# Altium footprint library DIM.PcbLib: 183 footprints (part 8 of 12)
Each footprint in its own frame and in the unit in brackets; x right, y up, seen from the top. Pads: shape width x height; smd on the part's side, far side on the other; paste and mask are expansions set on the pad; w line width, h text height; cw(c..) or ccw(c..) is an arc to the next point about the centre after c.
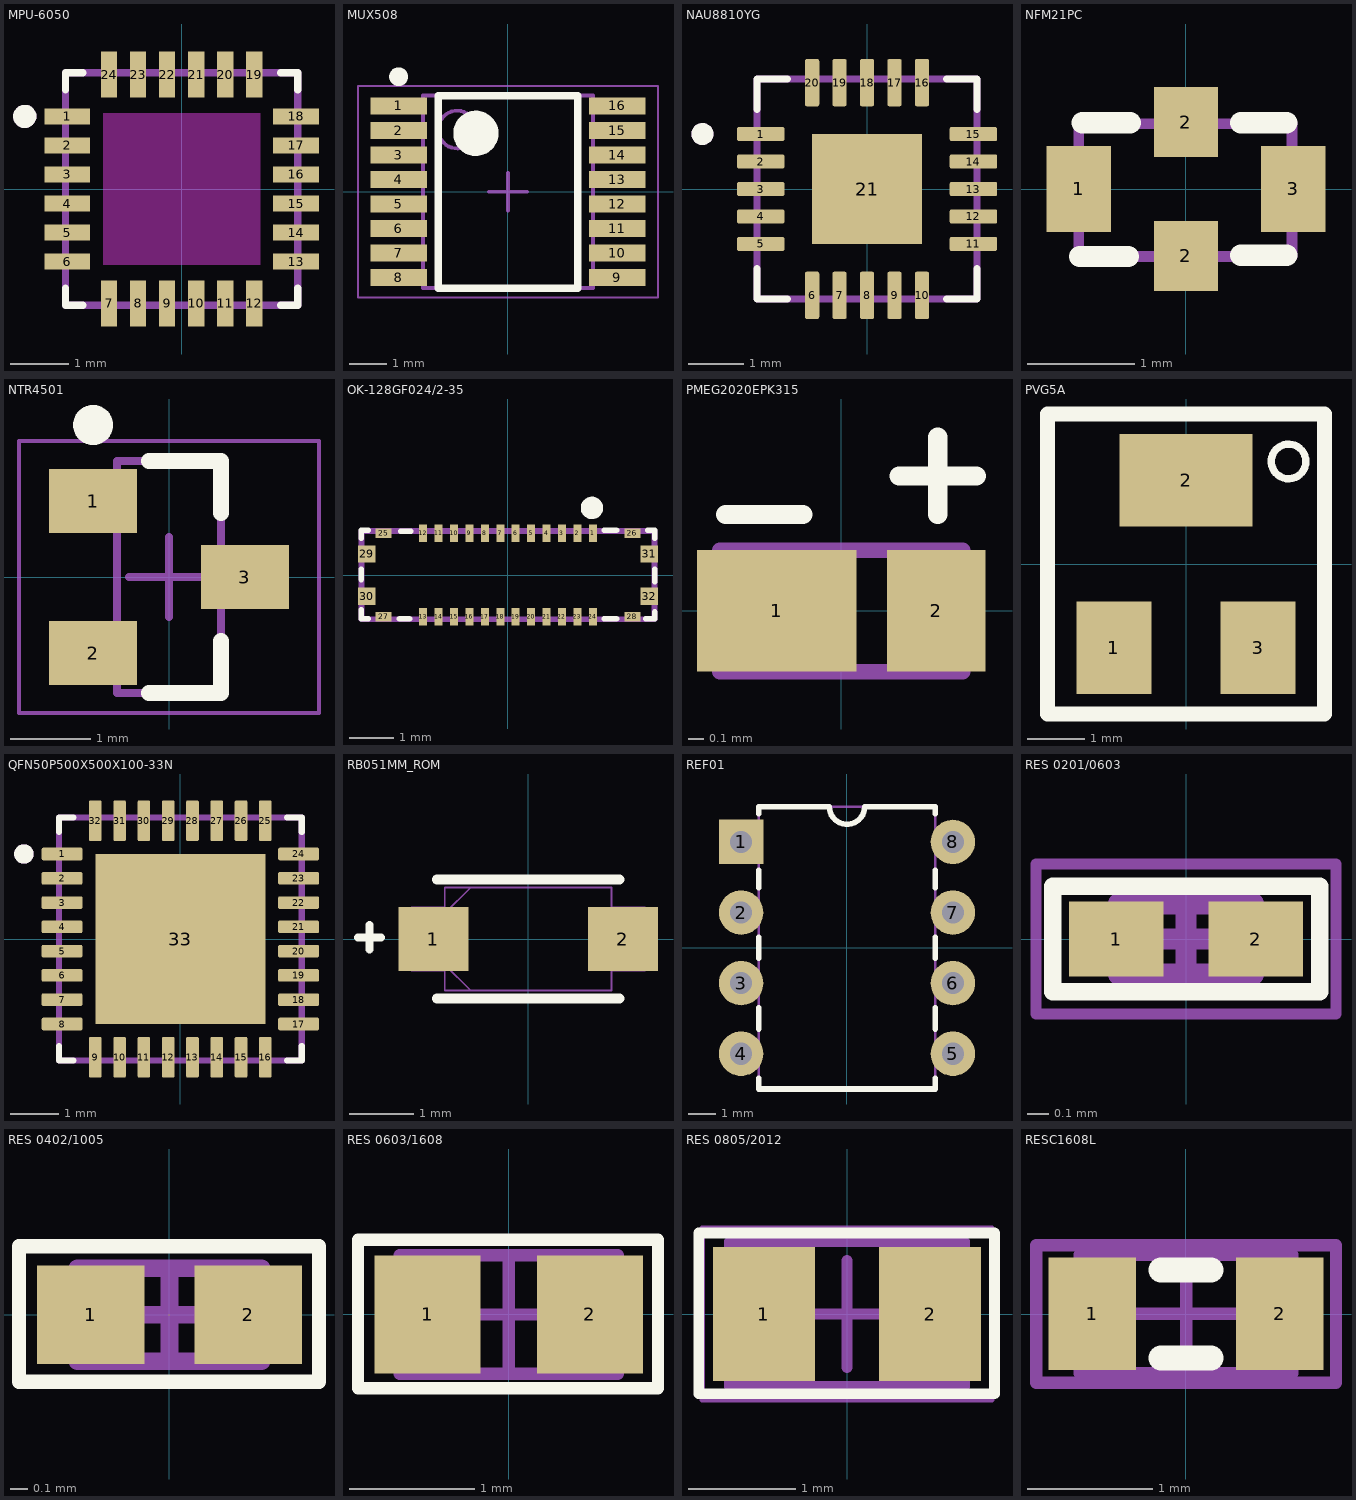
[diagram p7: the footprints below, top view; thin cyan lines are the x and y axes]

## MPU-6050 [mm]
height 0.95
pads (24):
  rect 0.79x0.28 smd: 1(-1.97,1.25) 2(-1.97,0.75) 3(-1.97,0.25) 4(-1.97,-0.25) 5(-1.97,-0.75) 6(-1.97,-1.25) 13(1.97,-1.25) 14(1.97,-0.75) 15(1.97,-0.25) 16(1.97,0.25) 17(1.97,0.75) 18(1.97,1.25)
  rect 0.28x0.79 smd: 7(-1.25,-1.97) 8(-0.75,-1.97) 9(-0.25,-1.97) 10(0.25,-1.97) 11(0.75,-1.97) 12(1.25,-1.97) 19(1.25,1.97) 20(0.75,1.97) 21(0.25,1.97) 22(-0.25,1.97) 23(-0.75,1.97) 24(-1.25,1.97)
Top Overlay:
  circle w0.2: c-2.7,1.25 r0.1
  lines w0.127: -2,-1.705 -2,-2 -1.705,-2 ; -2,1.705 -2,2 -1.705,2 ; 1.705,-2 2,-2 2,-1.705 ; 1.705,2 2,2 2,1.705
Keep-Out Layer:
  region: 1.35,-1.3 -1.35,-1.3 -1.35,1.3 1.35,1.3
Mechanical 13:
  circle w0.2: c-2.7,1.25 r0.1
  lines w0.127: -2,-2 -2,2 2,2 2,-2 -2,-2
3D body "step_temp.STEP": height 0.93, standoff -0.02, extent -2,-2 2,2

## MUX508 [mm]
height 1.2
pads (16):
  rect 1.5x0.45 smd: 1(-2.9,2.275) 2(-2.9,1.625) 3(-2.9,0.975) 4(-2.9,0.325) 5(-2.9,-0.325) 6(-2.9,-0.975) 7(-2.9,-1.625) 8(-2.9,-2.275) 9(2.9,-2.275) 10(2.9,-1.625) 11(2.9,-0.975) 12(2.9,-0.325) 13(2.9,0.325) 14(2.9,0.975) 15(2.9,1.625) 16(2.9,2.275)
Top Overlay:
  circle w0.6: c-0.85,1.55 r0.3
  circle w0.25: c-2.9,3.05 r0.125
  lines w0.2: -1.85,-2.55 1.85,-2.55 1.85,2.55 -1.85,2.55 -1.85,-2.55
Mechanical 13:
  circle w0.1: c-1.35,1.65 r0.5
  lines w0.1: -2.25,-2.55 2.25,-2.55 2.25,2.55 -2.25,2.55 -2.25,-2.55
Mechanical 15:
  lines w0.05: -3.975,-2.8 3.975,-2.8 3.975,2.8 -3.975,2.8 -3.975,-2.8
  lines w0.1: -0.5,0 0.5,0 ; 0,-0.5 0,0.5
3D body: height 1.2, standoff 0.1, extent -2.25,-2.55 2.25,2.55

## NAU8810YG [mm]
height 0.8
pads (21):
  rrect25% 0.86x0.26 smd: 1(-1.935,1) 2(-1.935,0.5) 3(-1.935,0) 4(-1.935,-0.5) 5(-1.935,-1) 11(1.935,-1) 12(1.935,-0.5) 13(1.935,0) 14(1.935,0.5) 15(1.935,1)
  rrect25% 0.26x0.86 smd: 6(-1,-1.935) 7(-0.5,-1.935) 8(0,-1.935) 9(0.5,-1.935) 10(1,-1.935) 16(1,1.935) 17(0.5,1.935) 18(0,1.935) 19(-0.5,1.935) 20(-1,1.935)
  rect 2x2 smd paste-0.37: 21(0,0)
Top Overlay:
  circle w0.2: c-2.995,1 r0.1
  lines w0.127: -2,-1.45 -2,-2 -1.45,-2 ; -2,1.45 -2,2 -1.45,2 ; 1.45,-2 2,-2 2,-1.45 ; 1.45,2 2,2 2,1.45
Mechanical 13:
  circle w0.2: c-2.995,1 r0.1
  lines w0.127: -2,-2 -2,2 2,2 2,-2 -2,-2
3D body: height 1, standoff 0, extent -2,-2 2,2

## NFM21PC [mm]
height 1.1
pads (4):
  rect 0.6x0.8 smd: 1(-1,0) 3(1,0)
  rect 0.6x0.65 smd: 2(0,-0.625) 2(0,0.625)
Top Overlay:
  lines w0.2: -0.99,-0.63 -0.54,-0.63 ; -0.97,0.62 -0.52,0.62 ; 0.51,-0.62 0.94,-0.62 ; 0.51,0.62 0.94,0.62
Mechanical 13:
  lines w0.1: -1,-0.63 0.99,-0.63 0.99,0.61 -0.99,0.61 -1,0.6 -1,-0.63
3D body "User Library-Chip Capacitor2.STEP": height 1.2, standoff 0, extent -1,-0.63 1,0.57

## NTR4501 [mm]
height 1
pads (3):
  rect 1.1x0.8 smd: 1(-0.95,0.95) 2(-0.95,-0.95) 3(0.95,0)
Top Overlay:
  circle w0.25: c-0.95,1.9 r0.125
  lines w0.2: -0.25,-1.45 0.65,-1.45 0.65,-0.8 ; -0.25,1.45 0.65,1.45 0.65,0.8
Mechanical 13:
  lines w0.1: -0.65,-1.45 -0.65,1.45 0.65,1.45 0.65,-1.45 -0.65,-1.45
Mechanical 15:
  lines w0.05: -1.875,-1.7 -1.875,1.7 1.875,1.7 1.875,-1.7 -1.875,-1.7
  lines w0.1: -0.5,0 0.5,0 ; 0,-0.5 0,0.5
3D body: height 1, standoff 0.05, extent -0.65,-1.45 0.65,1.45

## OK-128GF024/2-35 [mm]
pads (32):
  rect 0.18x0.4 smd paste+0 mask+0.05: 1(1.925,0.95)
  rect 0.18x0.4 smd mask+0.051: 2(1.575,0.95) 3(1.225,0.95) 4(0.875,0.95) 5(0.525,0.95) 6(0.175,0.95) 7(-0.175,0.95) 8(-0.525,0.95) 9(-0.875,0.95) 10(-1.225,0.95) 11(-1.575,0.95) 12(-1.925,0.95) 13(-1.925,-0.95) 14(-1.575,-0.95) 15(-1.225,-0.95) 16(-0.875,-0.95) 17(-0.525,-0.95) 18(-0.175,-0.95) 19(0.175,-0.95) 20(0.525,-0.95) 21(0.875,-0.95) 22(1.225,-0.95) 23(1.575,-0.95) 24(1.925,-0.95)
  rect 0.36x0.22 smd mask+0.051: 25(-2.825,0.95) 26(2.825,0.95) 27(-2.825,-0.95) 28(2.825,-0.95)
  rect 0.4x0.39 smd mask+0.051: 29(-3.205,0.48) 30(-3.205,-0.48) 31(3.205,0.48) 32(3.205,-0.48)
Top Overlay:
  circle w0.254: c1.905,1.524 r0.127
  lines w0.127: -3.327,-0.787 -3.327,-0.991 -3.175,-0.991 ; -3.327,-0.102 -3.327,0.127 ; -3.327,0.838 -3.327,1.016 -3.175,1.016 ; -2.464,-0.991 -2.235,-0.991 ; -2.438,0.991 -2.21,0.991 ; 2.184,-0.991 2.464,-0.991 ; 2.184,1.016 2.464,1.016 ; 3.124,-0.991 3.327,-0.991 3.327,-0.838 ; 3.175,1.016 3.327,1.016 3.327,0.838 ; 3.327,-0.152 3.327,0.127
Mechanical 13:
  lines w0.127: -3.325,-1 -3.325,1 3.325,1 3.325,-1 -3.325,-1
3D body: height 0.5, standoff 0, extent -3.325,-1 3.325,1

## PMEG2020EPK315 [mm]
pads (2):
  rect 1.05x0.8 smd mask+0.051: 1(-0.425,0)
  rect 0.65x0.8 smd mask+0.051: 2(0.625,0)
Top Overlay:
  lines w0.127: -0.762,0.635 -0.254,0.635 ; 0.381,0.889 0.889,0.889 ; 0.635,0.635 0.635,1.143
Mechanical 13:
  lines w0.1: -0.8,-0.4 -0.8,0.4 0.8,0.4 0.8,-0.4 -0.8,-0.4
3D body "PMEG2020EPK,315.stp": height 0.38, standoff 0, extent -0.805,-0.401 0.795,0.399

## PVG5A [mm]
pads (3):
  rect 1.3x1.6 smd: 1(-1.25,-1.45) 3(1.25,-1.45)
  rect 2.3x1.6 smd: 2(0,1.45)
Top Overlay:
  circle w0.127: c1.778,1.778 r0.3
  lines w0.254: -2.4,-2.6 -2.4,2.6 2.4,2.6 2.4,-2.6 -2.4,-2.6
3D body: height 5.1, standoff 0, extent -2.413,-2.603 2.413,2.604

## QFN50P500X500X100-33N [mm]
pads (33):
  rrect25% 0.84x0.26 smd: 1(-2.435,1.75) 2(-2.435,1.25) 3(-2.435,0.75) 4(-2.435,0.25) 5(-2.435,-0.25) 6(-2.435,-0.75) 7(-2.435,-1.25) 8(-2.435,-1.75) 17(2.435,-1.75) 18(2.435,-1.25) 19(2.435,-0.75) 20(2.435,-0.25) 21(2.435,0.25) 22(2.435,0.75) 23(2.435,1.25) 24(2.435,1.75)
  rrect25% 0.26x0.84 smd: 9(-1.75,-2.435) 10(-1.25,-2.435) 11(-0.75,-2.435) 12(-0.25,-2.435) 13(0.25,-2.435) 14(0.75,-2.435) 15(1.25,-2.435) 16(1.75,-2.435) 25(1.75,2.435) 26(1.25,2.435) 27(0.75,2.435) 28(0.25,2.435) 29(-0.25,2.435) 30(-0.75,2.435) 31(-1.25,2.435) 32(-1.75,2.435)
  rect 3.5x3.5 smd paste-0.64: 33(0,0)
Top Overlay:
  circle w0.2: c-3.221,1.75 r0.1
  lines w0.127: -2.5,-2.2 -2.5,-2.5 -2.2,-2.5 ; -2.5,2.2 -2.5,2.5 -2.2,2.5 ; 2.2,-2.5 2.5,-2.5 2.5,-2.2 ; 2.2,2.5 2.5,2.5 2.5,2.2
Mechanical 13:
  circle w0.2: c-3.221,1.75 r0.1
  lines w0.127: -2.5,-2.5 -2.5,2.5 2.5,2.5 2.5,-2.5 -2.5,-2.5
3D body "step_temp.STEP": height 1, standoff 0, extent -2.5,-2.5 2.5,2.5

## RB051MM_ROM [mil]
pads (2):
  rect 43x39 smd paste+0: 1(-58,0) 2(58,0)
Top Overlay:
  lines w5: -104.2,0.9 -90.2,0.9 ; -97.2,-6.5 -97.2,8.5
  lines w6: -56,-36.5 56,-36.5 ; -56,36.5 56,36.5
Mechanical 13:
  lines w1: -51,-15.75 -35.25,-31.5 ; -51,15.75 -35.25,31.5 ; -71.5,-19.5 -51,-19.5 -51,19.5 -71.5,19.5 -71.5,-19.5 ; -51,-31.5 -51,31.5 51,31.5 51,-31.5 -51,-31.5 ; 51,-19.5 71.5,-19.5 71.5,19.5 51,19.5 51,-19.5
3D body "DIO_RB051MM_ROM.step": height 35.24, standoff 0, extent -71.5,-31.5 71.5,31.5

## REF01 [mm]
pads (8):
  rect 1.6x1.6 hole 0.8: 1(-3.81,3.81)
  round 1.6 hole 0.8: 2(-3.81,1.27) 3(-3.81,-1.27) 4(-3.81,-3.81) 5(3.81,-3.81) 6(3.81,-1.27) 7(3.81,1.27) 8(3.81,3.81)
Top Overlay:
  lines w0.2: -3.175,-4.699 -3.175,-5.08 3.175,-5.08 3.175,-4.699 ; -3.175,-2.921 -3.175,-2.159 ; -3.175,-0.381 -3.175,0.381 ; -3.175,2.159 -3.175,2.794 ; -3.175,4.826 -3.175,5.08 -0.635,5.08 ccw(c0,5.08) 0.635,5.08 3.175,5.08 3.175,4.826 ; 3.175,-2.921 3.175,-2.159 ; 3.175,-0.381 3.175,0.381 ; 3.175,2.159 3.175,2.794
Mechanical 13:
  lines w0.1: -3.175,-5.08 -3.175,5.08 3.175,5.08 3.175,-5.08 -3.175,-5.08
3D body: height 5, standoff 0, extent -3.175,-5.08 3.175,5.08

## RES 0201/0603 [mm] "Chip Resistor, 2-Leads, Body 0.60x0.30mm, IPC Medium Density"
height 0.26
pads (2):
  rect 0.44x0.35 smd: 1(-0.325,0) 2(0.325,0)
Top Overlay:
  lines w0.08: -0.622,-0.246 0.624,-0.246 0.624,0.246 -0.622,0.246 -0.622,-0.246
Mechanical 13:
  lines w0.1: -0.315,-0.165 -0.315,0.165 0.315,0.165 0.315,-0.165 -0.315,-0.165
Mechanical 15:
  lines w0.05: -0.7,-0.35 -0.7,0.35 0.7,0.35 0.7,-0.35 -0.7,-0.35
  lines w0.1: -0.165,0 0.165,0 ; 0,-0.165 0,0.165
3D body "RES 0201.STEP": height 0.21, standoff -0.01, extent -0.3,-0.15 0.3,0.15

## RES 0402/1005 [mm] "Chip Resistor, 2-Leads, Body 1.0x0.5mm, IPC Medium Density"
height 0.4
pads (2):
  rect 0.6x0.55 smd: 1(-0.44,0) 2(0.44,0)
Top Overlay:
  lines w0.08: -0.841,-0.374 -0.841,-0.141 -0.841,0.382 0.836,0.382 0.836,-0.374 -0.841,-0.374
Mechanical 13:
  lines w0.1: -0.515,-0.26 0.515,-0.26 0.515,0.26 -0.515,0.26 -0.515,-0.26
Mechanical 15:
  lines w0.1: -0.26,0 0.26,0 ; 0,-0.26 0,0.26
3D body "0402 cap.STEP": height 0.52, standoff 0, extent -0.5,-0.262 0.5,0.262

## RES 0603/1608 [mm] "Chip Resistor, 2-Leads, Body 1.60x0.80mm, IPC Medium Density"
height 0.45
pads (2):
  rect 0.85x0.95 smd: 1(-0.65,0) 2(0.65,0)
Top Overlay:
  lines w0.1: -1.209,-0.59 1.197,-0.59 1.197,0.598 -1.209,0.598 -1.209,-0.59
Mechanical 13:
  lines w0.1: -0.875,-0.475 0.875,-0.475 0.875,0.475 -0.875,0.475 -0.875,-0.475
Mechanical 15:
  lines w0.1: -0.475,0 0.475,0 ; 0,-0.475 0,0.475
3D body "0603 resistor.STEP": height 0.45, standoff 0, extent -0.8,-0.4 0.8,0.4

## RES 0805/2012 [mm] "Chip Resistor, 2-Leads, Body 2.00x1.25mm, IPC High Density"
height 0.7
pads (2):
  rect 0.95x1.25 smd: 1(-0.775,0) 2(0.775,0)
Top Overlay:
  lines w0.1: -1.383,-0.744 1.377,-0.744 1.377,0.756 -1.383,0.756 -1.383,-0.744
Mechanical 13:
  lines w0.1: -1.1,-0.675 1.1,-0.675 1.1,0.675 -1.1,0.675 -1.1,-0.675
Mechanical 15:
  lines w0.05: -1.35,-0.8 1.35,-0.8 1.35,0.8 -1.35,0.8 -1.35,-0.8
  lines w0.1: -0.5,0 0.5,0 ; 0,-0.5 0,0.5
3D body "0805 resistor.STEP": height 0.6, standoff 0, extent -0.95,-0.625 1.05,0.625

## RESC1608L [mm] "Chip Resistor, Body 1.6x0.8mm, IPC High Density"
height 0.6
pads (2):
  rect 0.7x0.9 smd: 1(-0.75,0) 2(0.75,0)
Top Overlay:
  lines w0.2: -0.2,-0.35 0.2,-0.35 ; -0.2,0.35 0.2,0.35
Mechanical 13:
  lines w0.1: -0.85,-0.475 -0.85,0.475 0.85,0.475 0.85,-0.475 -0.85,-0.475
Mechanical 15:
  lines w0.1: -0.475,0 0.475,0 ; 0,-0.475 0,0.475 ; -1.2,-0.55 -1.2,0.55 1.2,0.55 1.2,-0.55 -1.2,-0.55
3D body "User Library-RES_0603L.STEP": height 0.44, standoff -0.03, extent -0.8,-0.406 0.8,0.394